# Altium footprint library IoT_SYNTHPATCH.PcbLib: 65 footprints (part 3 of 5)
Each footprint in its own frame and in the unit in brackets; x right, y up, seen from the top. Pads: shape width x height; smd on the part's side, far side on the other; paste and mask are expansions set on the pad; w line width, h text height; cw(c..) or ccw(c..) is an arc to the next point about the centre after c.
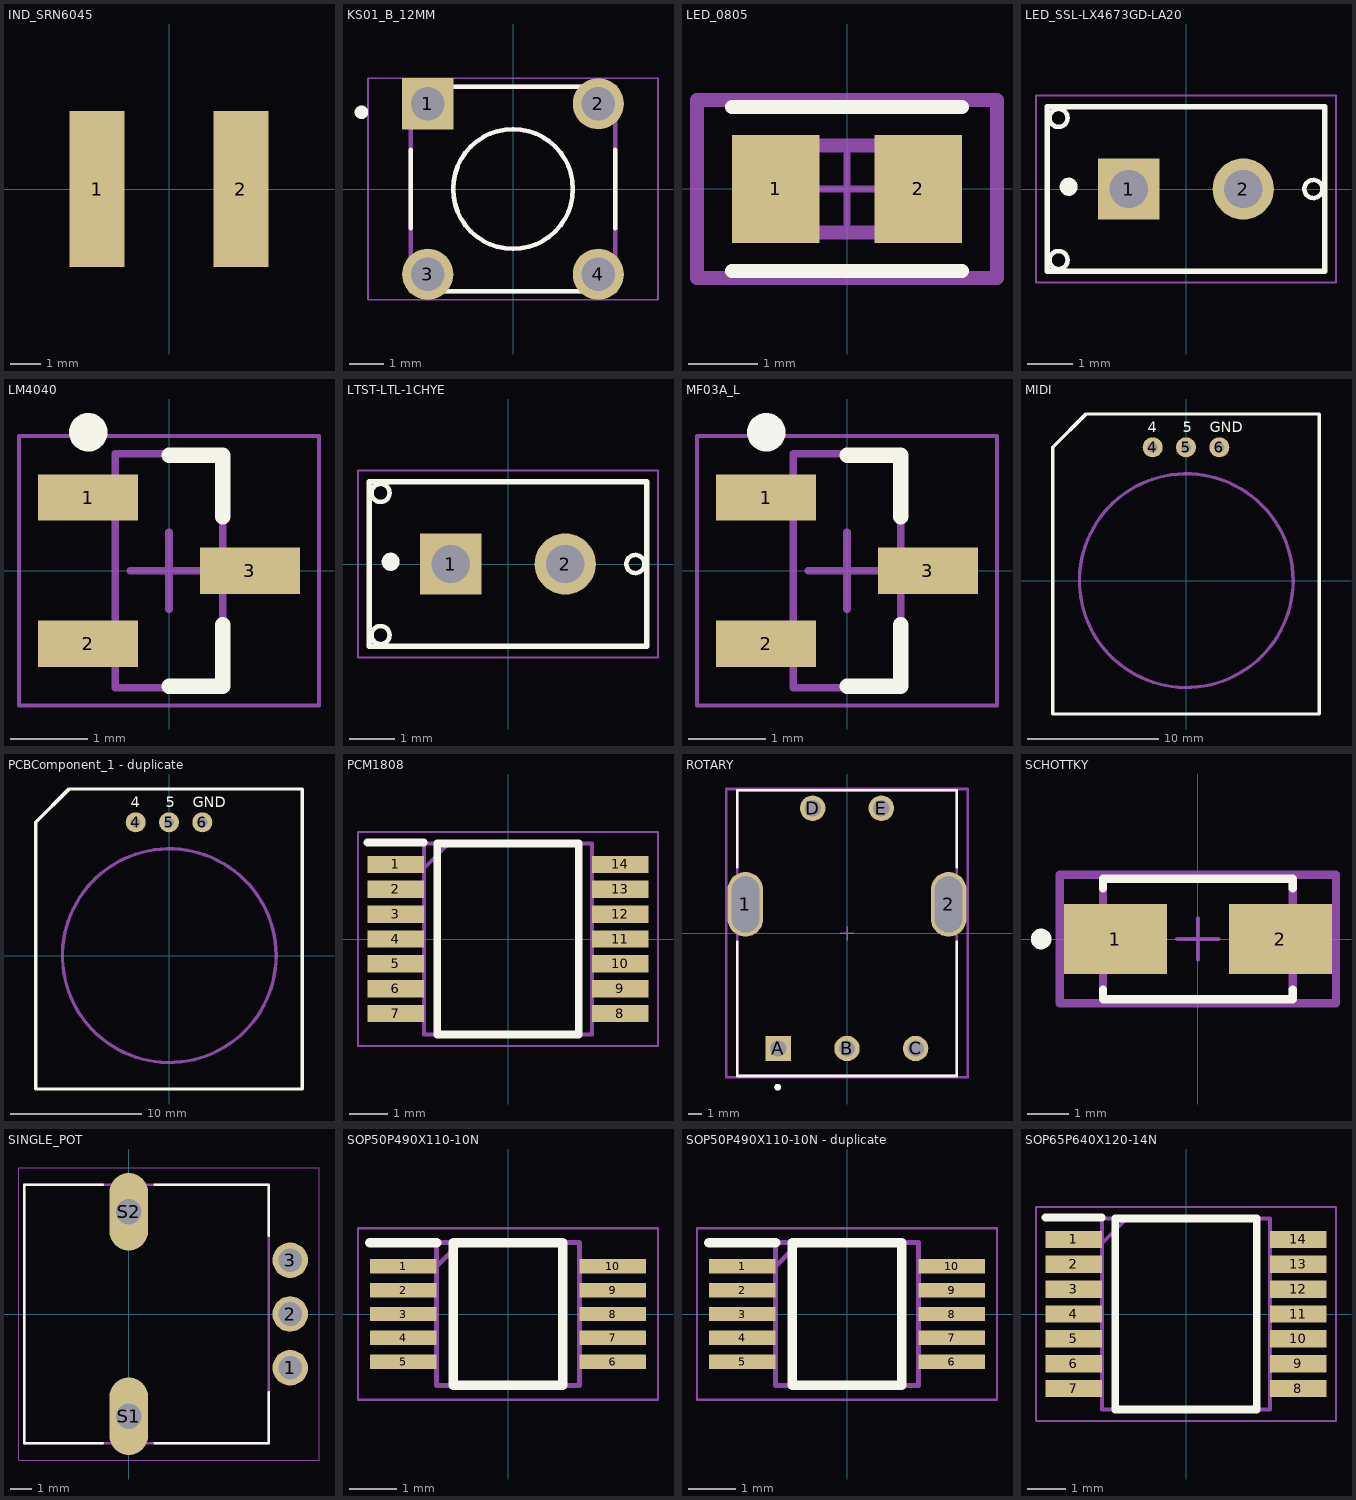
[diagram p2: the footprints below, top view; thin cyan lines are the x and y axes]

## IND_SRN6045 [mm] "6x6 mm shielded power inductor (Bourns SRN6045), pads 1.8x5.1 mm, 6.5 mm overall"
pads (2):
  rect 1.8x5.1 smd: 1(-2.35,0) 2(2.35,0)

## KS01_B_12MM [mm] "Highly Electric KS01-B (no LED) 12 mm round tact switch, 4x 1.0 mm holes on 5.0x5.0 mm grid; 1-2 common, 3-4 common"
pads (4):
  rect 1.498x1.498 / inner round 1.498 / far side rect 1.498x1.498 hole 0.99 mask+0.102: 1(-2.5,2.5)
  round 1.498 hole 0.99 mask+0.102: 2(2.5,2.5) 3(-2.5,-2.5) 4(2.5,-2.5)
Top Overlay:
  circle w0.2: c-4.445,2.25 r0.1
  circle w0.127: c0,0 r1.755
  lines w0.127: -2.995,-1.15 -2.995,1.15 ; -2.3,-2.995 2.3,-2.995 ; -2.2,2.995 2.3,2.995 ; 3,-1.15 3,1.15
Mechanical 13:
  circle w0.127: c0,0 r1.755
  lines w0.127: -2.995,-2.995 2.995,-2.995 2.995,2.995 -2.995,2.995 -2.995,-2.995
Mechanical 15:
  lines w0.05: -4.25,-3.25 4.25,-3.25 4.25,3.25 -4.25,3.25 -4.25,-3.25
3D body "step_temp.STEP": height 5.08, standoff -3.43, extent -3.773,-2.942 4.027,3.048

## LED_0805 [mm] "0805 SMD LED, pad 1 = anode, pad 2 = cathode"
pads (2):
  rect 1.255x1.556 smd paste+0 mask+0: 1(-1.025,0) 2(1.025,0)
Top Overlay:
  lines w0.2: -1.653,-1.178 1.653,-1.178 ; -1.653,1.178 1.653,1.178
Top 3D Body:
  lines w0.2: -1,-0.625 -1,0.625 1,0.625 1,-0.625 -1,-0.625
Top Courtyard:
  lines w0.2: -2.153,-1.278 -2.153,1.278 2.153,1.278 2.153,-1.278 -2.153,-1.278
Top Assembly:
  lines w0.2: -2.153,-1.278 -2.153,1.278 2.153,1.278 2.153,-1.278 -2.153,-1.278
  text ".Designator" at 0,0.187 h1
Top Component Center:
  lines w0.1: -0.5,0 0.5,0 ; 0,-0.5 0,0.5
3D body "Res_KOA_Speer_RN73R2ATTD3611C25_eec.STEP": height 0.25, standoff 0, extent -2.153,-1.278 2.153,1.278

## LED_SSL-LX4673GD-LA20 [mm]
pads (2):
  rect 1.358x1.358 / inner round 1.358 / far side rect 1.358x1.358 hole 0.85 mask+0.102: 1(-1.27,0)
  round 1.358 hole 0.85 mask+0.102: 2(1.27,0)
Top Overlay:
  circle w0.1: c2.825,0 r0.2
  circle w0.1: c-2.825,1.575 r0.2
  circle w0.1: c-2.825,-1.575 r0.2
  circle w0.2: c-2.6,0.05 r0.1
  lines w0.127: -3.075,-1.825 3.075,-1.825 3.075,1.825 -3.075,1.825 -3.075,-1.825
Mechanical 15:
  lines w0.05: -3.325,-2.075 3.325,-2.075 3.325,2.075 -3.325,2.075 -3.325,-2.075

## LM4040 [mm] "SOT23, 3-Leads, Body 2.9x1.3mm, Pitch 0.95mm, Lead Span 2.4mm, IPC Medium Density"
height 1.12
pads (3):
  rect 1.3x0.6 smd: 1(-1.05,0.95) 2(-1.05,-0.95) 3(1.05,0)
Top Overlay:
  circle w0.25: c-1.05,1.8 r0.125
  lines w0.2: 0,-1.5 0.7,-1.5 0.7,-0.7 ; 0,1.5 0.7,1.5 0.7,0.7
Mechanical 13:
  lines w0.1: -0.7,-1.52 -0.7,1.52 0.7,1.52 0.7,-1.52 -0.7,-1.52
Mechanical 15:
  lines w0.05: -1.95,-1.75 -1.95,1.75 1.95,1.75 1.95,-1.75 -1.95,-1.75
  lines w0.1: -0.5,0 0.5,0 ; 0,-0.5 0,0.5
3D body: height 1.12, standoff 0.03, extent -0.7,-1.52 0.7,1.52

## LTST-LTL-1CHYE [mm]
pads (2):
  rect 1.358x1.358 / inner round 1.358 / far side rect 1.358x1.358 hole 0.85 mask+0.102: 1(-1.27,0)
  round 1.358 hole 0.85 mask+0.102: 2(1.27,0)
Top Overlay:
  circle w0.1: c2.825,0 r0.2
  circle w0.1: c-2.825,1.575 r0.2
  circle w0.1: c-2.825,-1.575 r0.2
  circle w0.2: c-2.6,0.05 r0.1
  lines w0.127: -3.075,-1.825 3.075,-1.825 3.075,1.825 -3.075,1.825 -3.075,-1.825
Mechanical 15:
  lines w0.05: -3.325,-2.075 3.325,-2.075 3.325,2.075 -3.325,2.075 -3.325,-2.075

## MF03A_L [mm] "SOT23, 3-Leads, Body 2.9x1.3mm, Pitch 0.95mm, Lead Span 2.4mm, IPC Medium Density"
height 1.12
pads (3):
  rect 1.3x0.6 smd: 1(-1.05,0.95) 2(-1.05,-0.95) 3(1.05,0)
Top Overlay:
  circle w0.25: c-1.05,1.8 r0.125
  lines w0.2: 0,-1.5 0.7,-1.5 0.7,-0.7 ; 0,1.5 0.7,1.5 0.7,0.7
Mechanical 13:
  lines w0.1: -0.7,-1.52 0.7,-1.52 0.7,1.52 -0.7,1.52 -0.7,-1.52
Mechanical 15:
  lines w0.05: -1.95,-1.75 1.95,-1.75 1.95,1.75 -1.95,1.75 -1.95,-1.75
  lines w0.1: -0.5,0 0.5,0 ; 0,-0.5 0,0.5
3D body: height 1.12, standoff 0.03, extent -0.7,-1.52 0.7,1.52

## MIDI [mil]
pads (3):
  round 60 hole 30: 4(-100,400) 5(0,400) 6(100,400)
Top Overlay:
  lines w10: -400,-400 -400,400 -300,500 400,500 400,-400 -400,-400
  text "4" at -114.09,445.91 h31.5
  text "GND" at 70.91,445.91 h31.5
  text "5" at -9.09,445.91 h31.5
Mechanical 1:
  lines w10: 321.42,0.08 cw(c0.93,0.08) 321.41,1.67

## PCBComponent_1 - duplicate [mil]
pads (3):
  round 60 hole 30: 4(-100,400) 5(0,400) 6(100,400)
Top Overlay:
  lines w10: -400,-400 -400,400 -300,500 400,500 400,-400 -400,-400
  text "4" at -114.09,445.91 h31.5
  text "GND" at 70.91,445.91 h31.5
  text "5" at -9.09,445.91 h31.5
Mechanical 1:
  lines w10: 321.42,0.08 cw(c0.93,0.08) 321.41,1.67

## PCM1808 [mm]
pads (14):
  rect 1.475x0.45 smd: 1(-2.938,1.95) 2(-2.938,1.3) 3(-2.938,0.65) 4(-2.938,0) 5(-2.938,-0.65) 6(-2.938,-1.3) 7(-2.938,-1.95) 8(2.938,-1.95) 9(2.938,-1.3) 10(2.938,-0.65) 11(2.938,0) 12(2.938,0.65) 13(2.938,1.3) 14(2.938,1.95)
Top Overlay:
  lines w0.2: -3.675,2.525 -2.2,2.525 ; -1.85,-2.5 -1.85,2.5 1.85,2.5 1.85,-2.5 -1.85,-2.5
Mechanical 15:
  lines w0.1: -2.2,1.85 -1.55,2.5 ; -2.2,-2.5 -2.2,2.5 2.2,2.5 2.2,-2.5 -2.2,-2.5
Bottom Assembly:
  lines w0.05: -3.925,-2.8 -3.925,2.8 3.925,2.8 3.925,-2.8 -3.925,-2.8

## ROTARY [mm]
pads (7):
  rrect100% 2.6x4.7 hole 4.1 slot 2 at 0 deg paste-2539.97 mask+0: 1(-7.4,2.1) 2(7.4,2.1)
  rect 1.85x1.85 hole 1.2 paste-2539.97 mask+0: A(-5,-8.4)
  round 1.85 hole 1.2 paste-2539.97 mask+0: B(0,-8.4) C(5,-8.4) D(-2.5,9.1) E(2.5,9.1)
Top Overlay:
  circle w0.25: c-5.05,-11.225 r0.125
  lines w0.2: -8,-0.625 -8,-10.4 8,-10.4 8,-0.625 ; -8,4.825 -8,10.4 8,10.4 8,4.825
Top 3D Body:
  lines w0.2: -8,-10.4 8,-10.4 8,10.4 -8,10.4 -8,-10.4
Top Courtyard:
  lines w0.2: -8.8,-10.5 8.8,-10.5 8.8,10.5 -8.8,10.5 -8.8,-10.5
Top Assembly:
  lines w0.2: -8.8,-10.5 8.8,-10.5 8.8,10.5 -8.8,10.5 -8.8,-10.5
  text ".Designator" at 0,0.187 h1
Top Component Center:
  lines w0.1: -0.5,0 0.5,0 ; 0,-0.5 0,0.5
3D body "Enc_Bourns_Inc_PEC16-4115F-S0012_eec.STEP": height 0.25, standoff 0, extent -8.8,-10.5 8.8,10.5

## SCHOTTKY [mm]
pads (2):
  rect 2.5x1.7 smd paste+0 mask+0: 1(-2,0) 2(2,0)
Top Overlay:
  circle w0.25: c-3.8,0 r0.125
  lines w0.2: -2.3,-1.225 -2.3,-1.46 2.3,-1.46 2.3,-1.225 ; -2.3,1.225 -2.3,1.46 2.3,1.46 2.3,1.225
Top 3D Body:
  lines w0.2: -2.3,-1.46 -2.3,1.46 2.3,1.46 2.3,-1.46 -2.3,-1.46
Top Courtyard:
  lines w0.2: -3.35,-1.56 -3.35,1.56 3.35,1.56 3.35,-1.56 -3.35,-1.56
Top Assembly:
  lines w0.2: -3.35,-1.56 -3.35,1.56 3.35,1.56 3.35,-1.56 -3.35,-1.56
  text ".Designator" at 0,0.187 h1
Top Component Center:
  lines w0.1: -0.5,0 0.5,0 ; 0,-0.5 0,0.5
3D body "Diode_Diodes_Inc_SBRT5A50SA-13_eec.STEP": height 0.25, standoff 0, extent -3.35,-1.56 3.35,1.56

## SINGLE_POT [mm]
height 26
pads (5):
  round 1.65 hole 1.1: 1(7.5,-2.5) 2(7.5,0) 3(7.5,2.5)
  oval 1.8x3.6 hole 1.2 square: S1(0,-4.75) S2(0,4.75)
Top Overlay:
  lines w0.127: -1.22,-6 -4.85,-6 -4.85,6 -1.22,6 ; 1.22,-6 6.5,-6 6.5,-3.645 ; 1.22,6 6.5,6 6.5,3.645
Mechanical 13:
  lines w0.127: -4.85,-6 6.5,-6 6.5,6 -4.85,6 -4.85,-6
Mechanical 15:
  lines w0.05: -5.1,-6.8 -5.1,6.8 8.839,6.8 8.839,-6.8 -5.1,-6.8
3D body "RD901F-40-15R1-B100K-00DL1--3DModel-STEP-269445.STEP": height 25, standoff -3.5, extent -6.254,-5.873 7.396,6.127

## SOP50P490X110-10N [mm]
pads (10):
  rect 1.4x0.3 smd: 1(-2.2,1) 2(-2.2,0.5) 3(-2.2,0) 4(-2.2,-0.5) 5(-2.2,-1) 6(2.2,-1) 7(2.2,-0.5) 8(2.2,0) 9(2.2,0.5) 10(2.2,1)
Top Overlay:
  lines w0.2: -2.9,1.5 -1.5,1.5 ; -1.15,-1.5 -1.15,1.5 1.15,1.5 1.15,-1.5 -1.15,-1.5
Mechanical 15:
  lines w0.1: -1.5,1 -1,1.5 ; -1.5,-1.5 -1.5,1.5 1.5,1.5 1.5,-1.5 -1.5,-1.5
Bottom Assembly:
  lines w0.05: -3.15,-1.8 -3.15,1.8 3.15,1.8 3.15,-1.8 -3.15,-1.8

## SOP50P490X110-10N - duplicate [mm]
pads (10):
  rect 1.4x0.3 smd: 1(-2.2,1) 2(-2.2,0.5) 3(-2.2,0) 4(-2.2,-0.5) 5(-2.2,-1) 6(2.2,-1) 7(2.2,-0.5) 8(2.2,0) 9(2.2,0.5) 10(2.2,1)
Top Overlay:
  lines w0.2: -2.9,1.5 -1.5,1.5 ; -1.15,-1.5 -1.15,1.5 1.15,1.5 1.15,-1.5 -1.15,-1.5
Mechanical 15:
  lines w0.1: -1.5,1 -1,1.5 ; -1.5,-1.5 -1.5,1.5 1.5,1.5 1.5,-1.5 -1.5,-1.5
Bottom Assembly:
  lines w0.05: -3.15,-1.8 -3.15,1.8 3.15,1.8 3.15,-1.8 -3.15,-1.8

## SOP65P640X120-14N [mm]
pads (14):
  rect 1.475x0.45 smd: 1(-2.938,1.95) 2(-2.938,1.3) 3(-2.938,0.65) 4(-2.938,0) 5(-2.938,-0.65) 6(-2.938,-1.3) 7(-2.938,-1.95) 8(2.938,-1.95) 9(2.938,-1.3) 10(2.938,-0.65) 11(2.938,0) 12(2.938,0.65) 13(2.938,1.3) 14(2.938,1.95)
Top Overlay:
  lines w0.2: -3.675,2.525 -2.2,2.525 ; -1.85,-2.5 -1.85,2.5 1.85,2.5 1.85,-2.5 -1.85,-2.5
Mechanical 15:
  lines w0.1: -2.2,1.85 -1.55,2.5 ; -2.2,-2.5 -2.2,2.5 2.2,2.5 2.2,-2.5 -2.2,-2.5
Bottom Assembly:
  lines w0.05: -3.925,-2.8 -3.925,2.8 3.925,2.8 3.925,-2.8 -3.925,-2.8